# Altium footprint library SYNCBOX_V3I1.PcbLib: 268 footprints (part 12 of 17)
Each footprint in its own frame and in the unit in brackets; x right, y up, seen from the top. Pads: shape width x height; smd on the part's side, far side on the other; paste and mask are expansions set on the pad; w line width, h text height; cw(c..) or ccw(c..) is an arc to the next point about the centre after c.
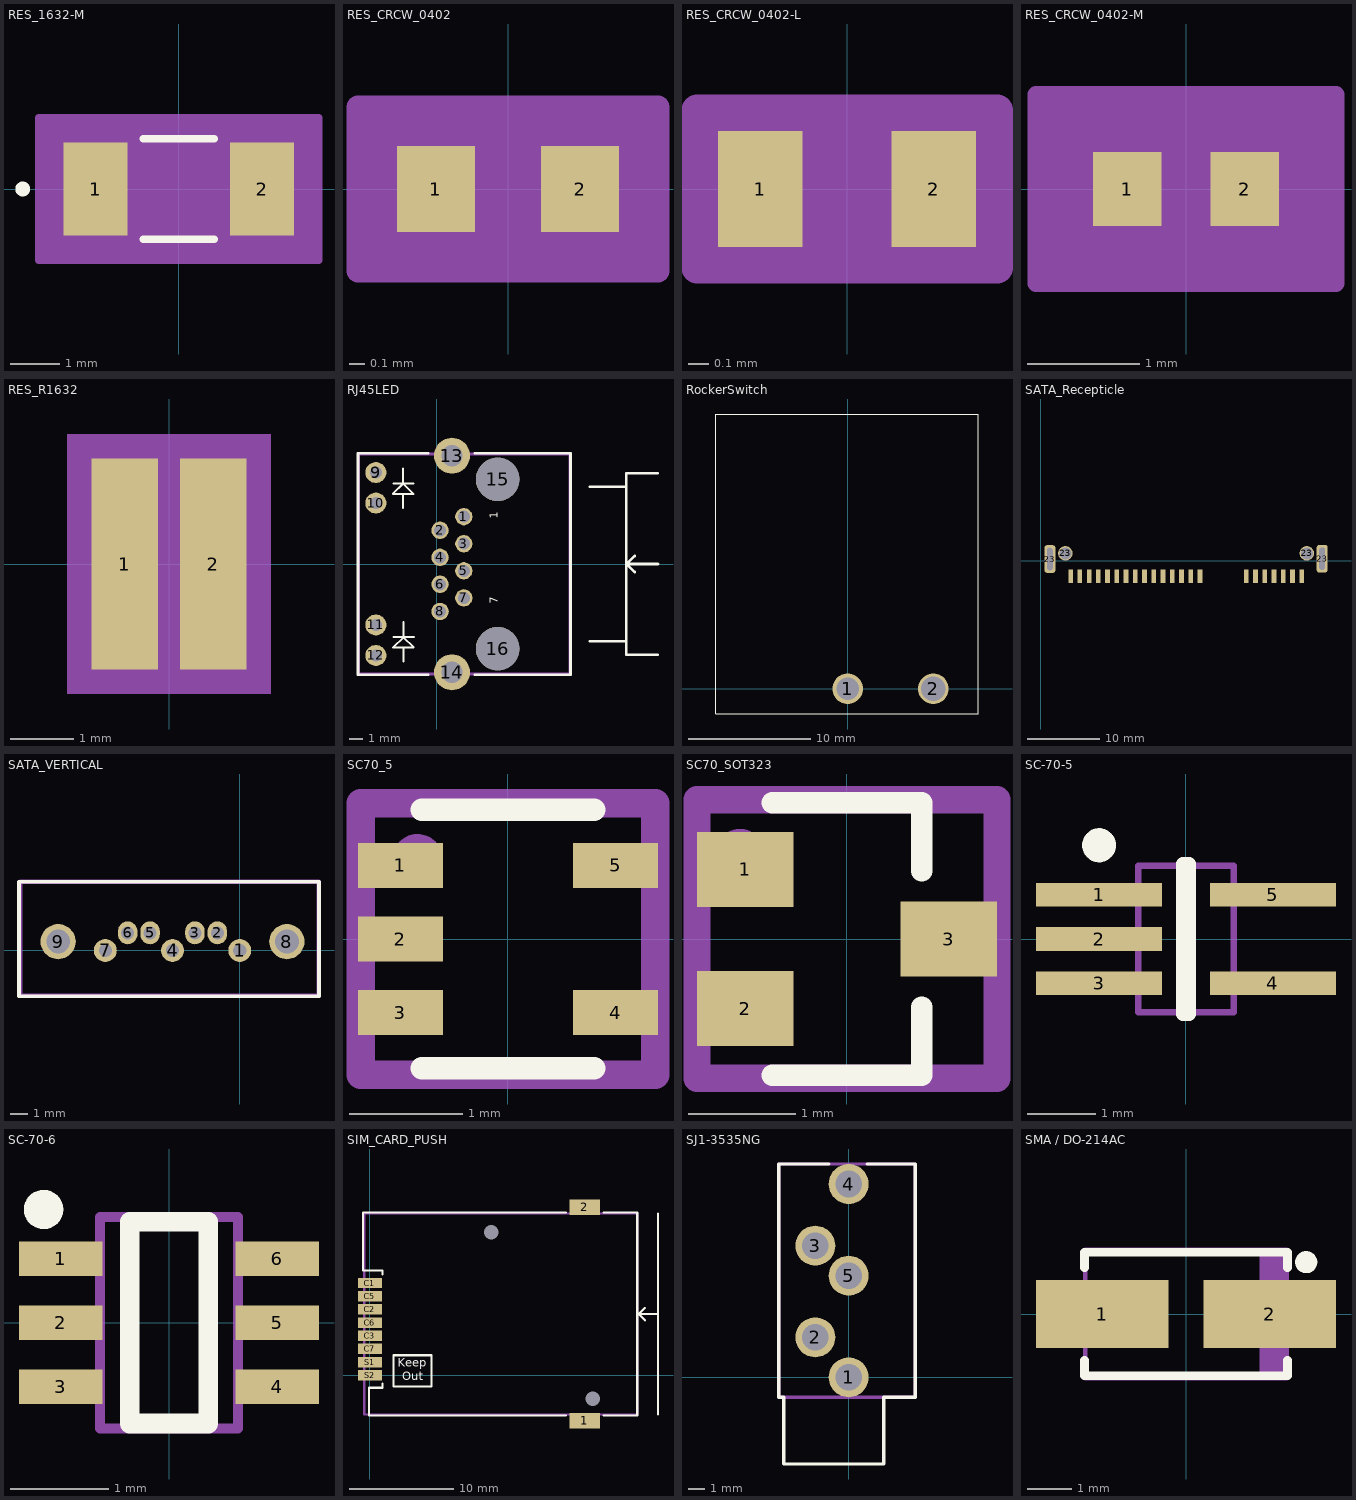
[diagram p11: the footprints below, top view; thin cyan lines are the x and y axes]

## RES_1632-M [mm]
pads (2):
  rect 1.309x1.902 smd paste+0 mask+0: 1(-1.704,0) 2(1.704,0)
Top Overlay:
  circle w0.152: c-3.197,0 r0.076
  lines w0.152: -0.726,-1.027 0.726,-1.027 ; -0.726,1.027 0.726,1.027
Mechanical 13:
  circle w0: c-1.577,0 r0.076
  lines w0.025: -1.8,-0.9 -1.8,0.9 ; -1.8,-0.9 1.8,-0.9 ; -1.8,-0.9 -1.05,-0.9 -1.05,0.9 -1.8,0.9 ; -1.8,-0.9 -1.8,0.9 ; -1.8,0.9 1.8,0.9 ; 1.8,-0.9 1.8,0.9 ; 1.8,-0.9 1.8,0.9 ; 1.8,-0.9 1.05,-0.9 1.05,0.9 1.8,0.9
Mechanical 15:
  region: 2.867,-1.459 -2.867,-1.459 -2.867,1.459 2.867,1.459
  lines w0.152: -2.867,-1.459 2.867,-1.459 2.867,1.459 -2.867,1.459 -2.867,-1.459
3D body "RES_1632-M.stp": height 0.5, standoff 0, extent -1.8,-0.9 1.8,0.9
3D body: height 0.25, standoff 0, extent 0,0 0.254,0.254

## RES_CRCW_0402 [mil]
pads (2):
  rect 20x22 smd paste+0 mask+0: 1(-18.5,0) 2(18.5,0)
Mechanical 13:
  lines w1: -20.5,-11 -20.5,11 ; -20.5,-11 -8.5,-11 -8.5,11 -20.5,11 ; -20.5,-11 20.5,-11 ; -20.5,-11 -20.5,11 ; -20.5,11 20.5,11 ; 20.5,-11 8.5,-11 8.5,11 20.5,11 ; 20.5,-11 20.5,11 ; 20.5,-11 20.5,11
Mechanical 15:
  region: 38.5,-21 -38.5,-21 -38.5,21 38.5,21
  lines w6: -38.5,-21 -38.5,21 38.5,21 38.5,-21 -38.5,-21
3D body "RES_CRCW_0402.stp": height 15.98, standoff 0, extent -20.51,-10.98 20.51,10.98
3D body: height 10, standoff 0, extent 0,0 10,10

## RES_CRCW_0402-L [mil]
pads (2):
  rect 16x22 smd paste+0 mask+0: 1(-16.5,0) 2(16.5,0)
Mechanical 13:
  lines w1: -20.5,-11 -20.5,11 ; -20.5,-11 -8.5,-11 -8.5,11 -20.5,11 ; -20.5,-11 20.5,-11 ; -20.5,-11 -20.5,11 ; -20.5,11 20.5,11 ; 20.5,-11 8.5,-11 8.5,11 20.5,11 ; 20.5,-11 20.5,11 ; 20.5,-11 20.5,11
Mechanical 15:
  region: 28.5,-15 -28.5,-15 -28.5,15 28.5,15
  lines w6: -28.5,-15 -28.5,15 28.5,15 28.5,-15 -28.5,-15
3D body "RES_CRCW_0402-L.stp": height 15.98, standoff 0, extent -20.51,-10.98 20.52,10.99
3D body: height 10, standoff 0, extent 0,0 10,10

## RES_CRCW_0402-M [mil]
pads (2):
  rect 24x26 smd paste+0 mask+0: 1(-20.5,0) 2(20.5,0)
Mechanical 13:
  lines w1: -20.5,-11 -20.5,11 ; -20.5,-11 20.5,-11 ; -20.5,-11 -8.5,-11 -8.5,11 -20.5,11 ; -20.5,-11 -20.5,11 ; -20.5,11 20.5,11 ; 20.5,-11 20.5,11 ; 20.5,-11 20.5,11 ; 20.5,-11 8.5,-11 8.5,11 20.5,11
Mechanical 15:
  region: 52.5,-33 -52.5,-33 -52.5,33 52.5,33
  lines w6: -52.5,-33 52.5,-33 52.5,33 -52.5,33 -52.5,-33
3D body "RES_CRCW_0402-M.stp": height 15.98, standoff 0, extent -20.51,-10.98 20.52,10.99
3D body: height 10, standoff 0, extent 0,0 10,10

## RES_R1632 [mil]
pads (2):
  rect 41.56x132 smd paste+0 mask+0: 1(-27.72,0) 2(27.72,0)
Mechanical 5:
  region: 63.5,-81 -63.5,-81 -63.5,81 63.5,81
Mechanical 13:
  circle w0: c-22.72,0 r3
  lines w1: -34.5,-66 -34.5,66 ; -34.5,-66 34.5,-66 ; -34.5,-66 -6.94,-66 -6.94,66 -34.5,66 ; -34.5,-66 -34.5,66 ; -34.5,66 34.5,66 ; 34.5,-66 34.5,66 ; 34.5,-66 34.5,66 ; 34.5,-66 6.94,-66 6.94,66 34.5,66
Mechanical 15:
  region: 58.5,-76 -58.5,-76 -58.5,76 58.5,76
  lines w6: -58.5,-76 58.5,-76 58.5,76 -58.5,76 -58.5,-76
3D body "RES_R1632.step": height 25.98, standoff 0, extent -34.49,-65.98 34.49,65.99
3D body: height 10, standoff 0, extent 0,0 10,10

## RJ45LED [mm]
pads (16):
  round 1.3 hole 0.9: 1(2.03,3.55) 2(0.25,2.53) 3(2.03,1.52) 4(0.25,0.5) 5(2.03,-0.51) 6(0.25,-1.52) 7(2.03,-2.54) 8(0.25,-3.56)
  round 1.575 hole 0.9: 9(-4.57,6.86) 10(-4.57,4.57) 11(-4.57,-4.57) 12(-4.57,-6.86)
  round 2.7 hole 1.6: 13(1.14,8.13) 14(1.14,-8.13)
  round 3.25 hole 3.25 unplated: 15(4.57,6.35) 16(4.57,-6.35)
Top Overlay:
  lines w0.15: -3.26,6.04 -1.74,6.04 ; -3.24,-5.48 -1.72,-5.48 ; -2.53,4.22 -2.53,5.26 ; -2.53,7.15 -2.53,6.03 -1.76,5.26 -3.29,5.26 -2.51,6.04 ; -2.51,-7.3 -2.51,-6.26 ; -2.51,-4.37 -2.51,-5.49 -1.74,-6.26 -3.27,-6.26 -2.49,-5.48
  lines w0.2: -0.66,-8.3 -5.91,-8.3 -5.91,8.3 -0.66,8.3 ; 2.86,-8.3 10.03,-8.3 10.03,8.3 2.86,8.3 ; 11.5,-5.8 14.23,-5.8 ; 11.5,5.8 14.23,5.8 ; 14.85,-0.6 14.25,0 ; 14.85,0.6 14.25,0 ; 16.58,-6.8 14.23,-6.8 14.23,6.8 16.58,6.8 ; 16.6,0 14.25,0
  text "1" at 4.58,3.4 h0.6
  text "7" at 4.58,-3 h0.6
Mechanical 16:
  lines w0.254: -5.87,-8.25 -5.87,8.25 10.03,8.25 10.03,-8.15 9.93,-8.25 -5.87,-8.25
Mechanical 29:
  text ".Designator" at 0.5,2 h1.52
3D body "c-2-406549-1-r4-3d.stp": height 14.8, standoff -3.92, extent -5.9,-9.3 10.821,9.328

## RockerSwitch [mm]
pads (2):
  round 2.5 hole 1.85: 1(0,0)
  round 2.5 hole 2: 2(7,0)
Top Overlay:
  lines w0.1: 10.668,22.403 10.668,-2.057 -10.77,-2.057 -10.77,22.428 10.668,22.428
3D body "R1966AxxxxxxGR.stp": height 13.24, standoff -6.16, extent -10.523,-0.758 10.421,22.131

## SATA_Recepticle [mm] "22 Pin Sata Connector"
pads (26):
  rect 0.65x1.9 smd: 1(35.87,-2.14) 2(34.6,-2.14) 3(33.33,-2.14) 4(32.06,-2.14) 5(30.79,-2.14) 6(29.52,-2.14) 7(28.25,-2.14) 8(21.905,-2.14) 9(20.635,-2.14) 10(19.365,-2.14) 11(18.095,-2.14) 12(16.825,-2.14) 13(15.555,-2.14) 14(14.285,-2.14) 15(13.015,-2.14) 16(11.745,-2.14) 17(10.475,-2.14) 18(9.205,-2.14) 19(7.935,-2.14) 20(6.665,-2.14) 21(5.395,-2.14) 22(4.125,-2.14)
  rrect50% 1.524x3.81 hole 0.762 slot 3.048 at 90 deg: 23(1.27,0.229) 23(38.684,0.279)
  round 2 hole 1.651: 23(3.404,1.016) 23(36.576,1.016)
3D body "470182000.stp": height 4.69, standoff -1.97, extent -0.225,-2.588 40.205,10.282

## SATA_VERTICAL [mm]
pads (9):
  round 1.3 hole 0.74: 1(0,0) 4(-3.81,0) 7(-7.62,0)
  oval 1.1x1.3 hole 0.74: 2(-1.27,1) 3(-2.54,1) 5(-5.08,1) 6(-6.35,1)
  round 2 hole 1.35: 8(2.67,0.5) 9(-10.29,0.5)
Top Overlay:
  lines w0.2: -12.51,-2.6 -12.51,3.9 4.49,3.9 4.49,-2.6 -12.51,-2.6
Mechanical 16:
  lines w0.254: -12.43,-2.555 -12.43,3.895 4.47,3.895 4.47,-2.555 -12.43,-2.555
Mechanical 29:
  text ".Designator" at -5.5,-0.2 h1.52
3D body "471554001.stp": height 8.43, standoff -2.62, extent -12.43,-2.555 4.47,3.895

## SC70_5 [mm]
pads (5):
  rect 0.75x0.4 smd mask+0.025: 1(-0.95,0.65) 2(-0.95,0) 3(-0.95,-0.65) 4(0.95,-0.65) 5(0.95,0.65)
Top Overlay:
  lines w0.2: -0.762,-1.143 0.762,-1.143 ; -0.762,1.143 0.762,1.143
Mechanical 16:
  circle w0.254: c-0.8,0.7 r0.1
  lines w0.254: -1.3,-1.2 -1.3,1.2 1.3,1.2 1.3,-1.2 -1.3,-1.2
Mechanical 29:
  text ".Designator" at 0.4,-0.8 h0.6
3D body: height 0.8, standoff 0, extent 0.762,0.445 1.206,0.826
3D body: height 0.8, standoff 0, extent 0.762,-0.826 1.206,-0.445
3D body: height 0.8, standoff 0, extent -1.206,-0.826 -0.762,-0.445
3D body: height 0.8, standoff 0, extent -1.206,-0.191 -0.762,0.191
3D body: height 0.8, standoff 0, extent -1.206,0.445 -0.762,0.826
3D body: height 1.1, standoff 0, extent -0.762,-1.143 0.762,1.143

## SC70_SOT323 [mm]
pads (3):
  rect 0.9x0.7 smd: 1(-0.95,0.65) 2(-0.95,-0.65) 3(0.95,0)
Top Overlay:
  lines w0.2: -0.699,-1.27 0.699,-1.27 0.699,-0.635 ; -0.699,1.27 0.699,1.27 0.699,0.635
Mechanical 16:
  circle w0.254: c-1,0.8 r0.1
  lines w0.254: -1.4,-1.3 -1.4,1.3 1.4,1.3 1.4,-1.3 -1.4,-1.3
Mechanical 29:
  text ".Designator" at 0.3,-0.4 h0.6
3D body: height 0.75, standoff 0, extent 0.699,-0.318 1.27,0.381
3D body: height 0.75, standoff 0, extent -1.27,-1.016 -0.699,-0.318
3D body: height 0.75, standoff 0, extent -1.27,0.318 -0.699,1.016
3D body: height 1.1, standoff 0, extent -0.699,-1.27 0.699,1.27

## SC-70-5 [mm] "SOT23, 5-Leads, Body 2.2x2.4mm (max), Pitch 0.65mm, IPC Medium Density"
height 1.1
pads (5):
  rect 1.85x0.35 smd: 1(-1.275,0.65) 2(-1.275,0) 3(-1.275,-0.65) 4(1.275,-0.65) 5(1.275,0.65)
Top Overlay:
  circle w0.25: c-1.275,1.375 r0.125
  lines w0.2: -0.05,-1.1 0.05,-1.1 0.05,1.1 -0.05,1.1 -0.05,-1.1
Mechanical 13:
  lines w0.1: -0.7,-1.075 -0.7,1.075 0.7,1.075 0.7,-1.075 -0.7,-1.075
3D body: height 1.1, standoff 0, extent -0.7,-1.075 0.7,1.075

## SC-70-6 [mm]
height 1.1
pads (6):
  rect 0.85x0.35 smd: 1(-1.1,0.65) 2(-1.1,0) 3(-1.1,-0.65) 4(1.1,-0.65) 5(1.1,0) 6(1.1,0.65)
Top Overlay:
  circle w0.2: c-1.275,1.15 r0.1
  lines w0.2: -0.4,-1.025 0.4,-1.025 0.4,1.025 -0.4,1.025 -0.4,-1.025
Mechanical 13:
  lines w0.1: -0.7,-1.075 -0.7,1.075 0.7,1.075 0.7,-1.075 -0.7,-1.075
3D body: height 1.1, standoff 0, extent -0.7,-1.075 0.7,1.075

## SIM_CARD_PUSH [mm]
pads (12):
  rect 2.95x1.5 smd: 1(20.7,-4.37) 2(20.7,16.18)
  rrect70% 0x0 hole 1.4: 3(21.47,-2.26) 4(11.67,13.79)
  rect 2.3x1 smd mask+0.051: C1(0,8.89) C2(0,6.35) C3(0,3.81) C5(0,7.62) C6(0,5.08) C7(0,2.54) S1(0,1.27) S2(0,0)
Top Overlay:
  lines w0.2: 1.19,9.71 1.19,10.1 -0.65,10.1 -0.65,15.68 18.9,15.68 ; 1.2,-0.8 1.2,-1.2 -0.1,-1.2 -0.1,-3.87 18.9,-3.87 ; 22.5,-3.87 25.75,-3.87 25.75,15.68 22.5,15.68 ; 26.5,5.3 25.9,5.9 ; 26.5,6.5 25.9,5.9 ; 27.75,-3.77 27.75,15.58 ; 27.75,5.9 25.9,5.9 ; 2.25,-1.07 2.25,1.93 5.95,1.93 5.95,-1.07 2.25,-1.07
  text "Out" at 3.1,-0.5 h0.8
  text "Keep" at 2.7,0.8 h0.8
Mechanical 16:
  lines w0.2: -0.55,-3.77 -0.55,15.58 25.75,15.58 25.75,-3.77 -0.55,-3.77
Mechanical 29:
  text ".Designator" at 14.5,6 h1.52
3D body "475531001.stp": height 1.8, standoff -0.7, extent -0.55,-4.6 25.95,16.35

## SJ1-3535NG [mm]
pads (5):
  round 2.4 hole 1.6: 1(0,0) 2(-2,2.4) 3(-2,7.9) 4(0,11.6) 5(0,6.1)
Top Overlay:
  lines w0.2: -1.2,12.8 -4.2,12.8 -4.2,-1.2 -3.9,-1.2 -3.9,-5.2 2.1,-5.2 2.1,-1.2 4,-1.2 4,12.8 1.1,12.8
Top Solder:
  region: -1.65,8.65 0.65,6.35 -0.35,5.35 -2.65,7.65
Mechanical 1:
  lines w0.2: -4.2,12.8 -4.2,12.8
Mechanical 16:
  lines w0.2: -4.2,-1.2 -4.2,12.8 4,12.8 4,-1.2 -4.2,-1.2
Mechanical 29:
  text ".Designator" at -2,5.5 h1.2
3D body "SJ1-3535NG-PI.step": height 12.3, standoff -3.3, extent -4.2,-5.25 4,12.8

## SMA / DO-214AC [mm]
height 2.62
pads (2):
  rect 3x1.55 smd: 1(-1.9,0) 2(1.9,0)
Top Overlay:
  circle w0.25: c2.725,1.175 r0.125
  lines w0.2: -2.3,-1.05 -2.3,-1.4 2.3,-1.4 2.3,-1.05 ; -2.3,1.05 -2.3,1.4 2.3,1.4 2.3,1.05
Mechanical 13:
  rectangle: 1.67,-1.46 2.285,1.46
  lines w0.1: -2.285,-1.46 2.285,-1.46 2.285,1.46 -2.285,1.46 -2.285,-1.46
3D body "SMASeries.stp": height 2.34, standoff 0, extent -2.693,-1.422 2.591,1.372